# Altium schematic symbol library PS1-CO-1000.SchLib: 1 symbol
Pins are listed as number, name and electrical type; pins without a type are passive.

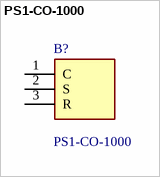
[diagram p0: symbol PS1-CO-1000]

## PS1-CO-1000
designator B?
Air Quality Sensors PS1 Series Solid Polymer Gas Sensor Carbon Monoxide 1000ppm; Manufacturer_Name: Amphenol; Geometry.Height: 5.6mm; Mouser Part Number: 523-PS1-CO-1000; Mouser Price/Stock: https://www.mouser.co.uk/ProductDetail/Amphenol-SGX-Sensortech/PS1-CO-1000?qs=vvQtp7zwQdOpteLmAHIDrw%3D%3D; Manufacturer_Part_Number: PS1-CO-1000; Datasheet Link: https://sgx.cdistore.com/datasheets/sgx/ds-0368-ps1ps4-co-1000.pdf
footprint PS1CO1000
pins: 1 C, 2 S, 3 R